# Altium footprint library FootPrintLib_8.PcbLib: 590 footprints (part 32 of 37)
Each footprint in its own frame and in the unit in brackets; x right, y up, seen from the top. Pads: shape width x height; smd on the part's side, far side on the other; paste and mask are expansions set on the pad; w line width, h text height; cw(c..) or ccw(c..) is an arc to the next point about the centre after c.
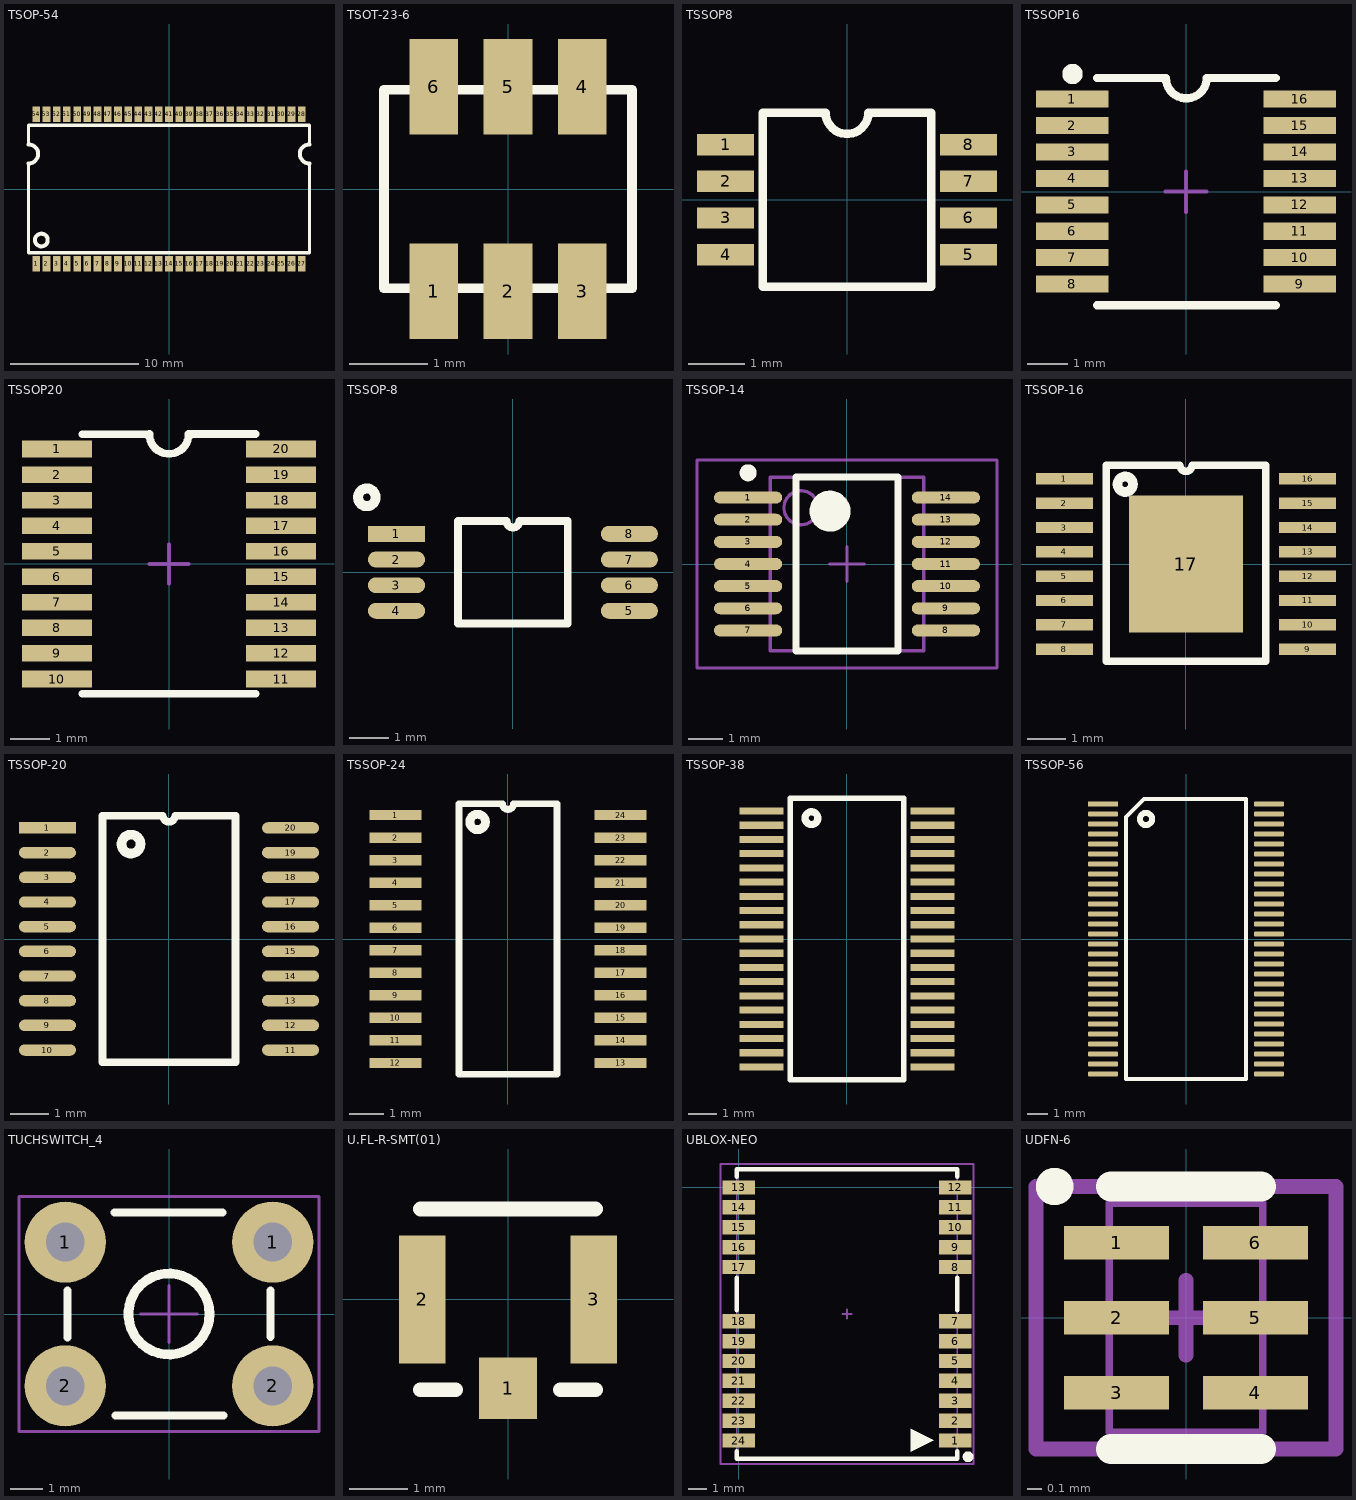
[diagram p31: the footprints below, top view; thin cyan lines are the x and y axes]

## TSOP-54 [mm] "SDRAM Memory IC"
height 2
pads (54):
  rect 0.6x1.2 smd: 1(-10.4,-5.85) 2(-9.6,-5.85) 3(-8.8,-5.85) 4(-8,-5.85) 5(-7.2,-5.85) 6(-6.4,-5.85) 7(-5.6,-5.85) 8(-4.8,-5.85) 9(-4,-5.85) 10(-3.2,-5.85) 11(-2.4,-5.85) 12(-1.6,-5.85) 13(-0.8,-5.85) 14(0,-5.85) 15(0.8,-5.85) 16(1.6,-5.85) 17(2.4,-5.85) 18(3.2,-5.85) 19(4,-5.85) 20(4.8,-5.85) 21(5.6,-5.85) 22(6.4,-5.85) 23(7.2,-5.85) 24(8,-5.85) 25(8.8,-5.85) 26(9.6,-5.85) 27(10.4,-5.85) 28(10.4,5.85) 29(9.6,5.85) 30(8.8,5.85) 31(8,5.85) 32(7.2,5.85) 33(6.4,5.85) 34(5.6,5.85) 35(4.8,5.85) 36(4,5.85) 37(3.2,5.85) 38(2.4,5.85) 39(1.6,5.85) 40(0.8,5.85) 41(0,5.85) 42(-0.8,5.85) 43(-1.6,5.85) 44(-2.4,5.85) 45(-3.2,5.85) 46(-4,5.85) 47(-4.8,5.85) 48(-5.6,5.85) 49(-6.4,5.85) 50(-7.2,5.85) 51(-8,5.85) 52(-8.8,5.85) 53(-9.6,5.85) 54(-10.4,5.85)
Top Overlay:
  circle w0.305: c-10,-4 r0.5
  lines w0.254: -11,2 -11,-5 11,-5 11,2 ; -11,3.5 -11,5 11,5 11,3.5
  lines w0.305: -11,2 ccw(c-11,2.75) -11,3.5 ; 11,2 cw(c11,2.75) 11,3.5

## TSOT-23-6 [mm]
height 0.7
pads (6):
  rect 0.622x1.22 smd: 1(-0.95,-1.31) 2(0,-1.31) 3(0.95,-1.31) 4(0.95,1.31) 5(0,1.31) 6(-0.95,1.31)
Top Overlay:
  lines w0.127: -1.587,-1.27 1.587,-1.27 1.587,1.27 -1.587,1.27 -1.587,-1.27

## TSSOP8 [mil]
height 47.24
pads (8):
  rect 40x15 smd: 1(-85,38.39) 2(-85,12.8) 3(-85,-12.79) 4(-85,-38.39) 5(85,-38.39) 6(85,-12.79) 7(85,12.79) 8(85,38.39)
Top Overlay:
  lines w5.98: -59.06,-61.02 -59.06,61.02 -15,61.02 ccw(c0,61.02) 15,61.02 59.06,61.02 59.06,-61.02 -59.06,-61.02
3D body "SW3dPS-TSSOP8-1.STEP": height 43.31, standoff 0, extent -80.7,-61.03 80.71,61.02

## TSSOP16 [mm] "16 Pin TSSOP JDEC MO-153 Variation AC"
height 1.2
pads (16):
  rect 1.78x0.42 smd: 1(-2.8,2.275) 2(-2.8,1.625) 3(-2.8,0.975) 4(-2.8,0.325) 5(-2.8,-0.325) 6(-2.8,-0.975) 7(-2.8,-1.625) 8(-2.8,-2.275) 9(2.8,-2.275) 10(2.8,-1.625) 11(2.8,-0.975) 12(2.8,-0.325) 13(2.8,0.325) 14(2.8,0.975) 15(2.8,1.625) 16(2.8,2.275)
Top Overlay:
  circle w0.25: c-2.794,2.894 r0.125
  lines w0.2: -2.192,-2.794 2.208,-2.794 ; -2.192,2.794 -0.492,2.794 ccw(c0.008,2.794) 0.508,2.794 2.208,2.794
Mechanical 15:
  lines w0.1: -0.5,0 0.5,0 ; 0,-0.5 0,0.5
3D body "User Library-TSSOP-16-1.STEP": height 1.1, standoff 0, extent -3.2,-2.5 3.2,2.5

## TSSOP20 [mm] "20 Pin TSSOP JDEC MO-153 Variation AC"
height 1.2
pads (20):
  rect 1.78x0.42 smd: 1(-2.85,2.925) 2(-2.85,2.275) 3(-2.85,1.625) 4(-2.85,0.975) 5(-2.85,0.325) 6(-2.85,-0.325) 7(-2.85,-0.975) 8(-2.85,-1.625) 9(-2.85,-2.275) 10(-2.85,-2.925) 11(2.85,-2.925) 12(2.85,-2.275) 13(2.85,-1.625) 14(2.85,-0.975) 15(2.85,-0.325) 16(2.85,0.325) 17(2.85,0.975) 18(2.85,1.625) 19(2.85,2.275) 20(2.85,2.925)
Top Overlay:
  lines w0.2: -2.2,-3.3 2.2,-3.3 ; -2.2,3.3 -0.5,3.3 ; -0.5,3.302 ccw(c0,3.302) 0.5,3.302 2.2,3.302
Mechanical 15:
  lines w0.1: -0.5,0 0.5,0 ; 0,-0.5 0,0.5
3D body "User Library-tssop-20-1.STEP": height 1.2, standoff 0, extent -3.3,-3.3 3.3,3.3

## TSSOP-8 [mm]
pads (8):
  rect 1.45x0.4 smd: 1(-2.95,0.975)
  oval 1.45x0.4 smd: 2(-2.95,0.325) 3(-2.95,-0.325) 4(-2.95,-0.975) 5(2.95,-0.975) 6(2.95,-0.325) 7(2.95,0.325) 8(2.95,0.975)
Top Overlay:
  circle w0.254: c-3.7,1.9 r0.224
  lines w0.2: -1.39,-1.3 1.39,-1.3 1.39,1.3 0.162,1.3 cw(c0,1.3) -0.162,1.3 -1.39,1.3 -1.39,-1.3
3D body "User Library-TSSOP-8.STEP": height 1.2, standoff 0, extent -3.2,-1.5 3.2,1.5

## TSSOP-14 [mm]
pads (14):
  oval 2x0.35 smd: 1(-2.9,1.95) 2(-2.9,1.3) 3(-2.9,0.65) 4(-2.9,0) 5(-2.9,-0.65) 6(-2.9,-1.3) 7(-2.9,-1.95) 8(2.9,-1.95) 9(2.9,-1.3) 10(2.9,-0.65) 11(2.9,0) 12(2.9,0.65) 13(2.9,1.3) 14(2.9,1.95)
Top Overlay:
  circle w0.6: c-0.5,1.55 r0.3
  circle w0.25: c-2.9,2.675 r0.125
  lines w0.2: -1.5,-2.55 1.5,-2.55 1.5,2.55 -1.5,2.55 -1.5,-2.55
Mechanical 13:
  circle w0.1: c-1.35,1.65 r0.5
  lines w0.1: -2.25,-2.55 2.25,-2.55 2.25,2.55 -2.25,2.55 -2.25,-2.55
Mechanical 15:
  lines w0.1: -0.5,0 0.5,0 ; 0,-0.5 0,0.5 ; -4.4,-3.05 4.4,-3.05 4.4,3.05 -4.4,3.05 -4.4,-3.05
3D body "User Library-TSSOP-14.STEP": height 1.2, standoff 0, extent -3.2,-2.5 3.2,2.5

## TSSOP-16 [mm]
pads (17):
  rect 1.5x0.3 smd: 1(-3.2,2.24) 2(-3.2,1.6) 3(-3.2,0.96) 4(-3.2,0.32) 5(-3.2,-0.32) 6(-3.2,-0.96) 7(-3.2,-1.6) 8(-3.2,-2.24) 9(3.2,-2.24) 10(3.2,-1.6) 11(3.2,-0.96) 12(3.2,-0.32) 13(3.2,0.32) 14(3.2,0.96) 15(3.2,1.6) 16(3.2,2.24)
  rect 3x3.6 smd: 17(0,0)
Top Overlay:
  circle w0.254: c-1.6,2.1 r0.204
  lines w0.2: -2.1,-2.56 2.1,-2.56 2.1,2.605 0.163,2.605 cw(c0,2.605) -0.162,2.605 -2.1,2.605 -2.1,-2.56
3D body "User Library-TSSOP-16-1.STEP": height 1.1, standoff 0, extent -3.2,-2.5 3.2,2.5

## TSSOP-20 [mm]
pads (20):
  rect 1.5x0.3 smd: 1(-3.2,2.925)
  oval 1.5x0.3 smd: 2(-3.2,2.275) 3(-3.2,1.625) 4(-3.2,0.975) 5(-3.2,0.325) 6(-3.2,-0.325) 7(-3.2,-0.975) 8(-3.2,-1.625) 9(-3.2,-2.275) 10(-3.2,-2.925) 11(3.2,-2.925) 12(3.2,-2.275) 13(3.2,-1.625) 14(3.2,-0.975) 15(3.2,-0.325) 16(3.2,0.325) 17(3.2,0.975) 18(3.2,1.625) 19(3.2,2.275) 20(3.2,2.925)
Top Overlay:
  circle w0.254: c-1,2.5 r0.25
  lines w0.2: -1.75,-3.25 1.75,-3.25 1.75,3.25 0.162,3.25 cw(c0,3.25) -0.162,3.25 -1.75,3.25 -1.75,-3.25
3D body "User Library-TSSOP-20-2.STEP": height 1.2, standoff 0, extent -3.2,-3.25 3.2,3.25

## TSSOP-24 [mm]
pads (24):
  rect 1.5x0.3 smd: 1(-3.25,3.575)
  rect 1.5x0.3 smd mask+0.05: 2(-3.25,2.925) 3(-3.25,2.275) 4(-3.25,1.625) 5(-3.25,0.975) 6(-3.25,0.325) 7(-3.25,-0.325) 8(-3.25,-0.975) 9(-3.25,-1.625) 10(-3.25,-2.275) 11(-3.25,-2.925) 12(-3.25,-3.575) 13(3.25,-3.575) 14(3.25,-2.925) 15(3.25,-2.275) 16(3.25,-1.625) 17(3.25,-0.975) 18(3.25,-0.325) 19(3.25,0.325) 20(3.25,0.975) 21(3.25,1.625) 22(3.25,2.275) 23(3.25,2.925) 24(3.25,3.575)
Top Overlay:
  circle w0.254: c-0.875,3.375 r0.224
  lines w0.2: -1.415,-3.9 1.415,-3.9 1.415,3.9 0.162,3.9 cw(c0,3.9) -0.162,3.9 -1.415,3.9 -1.415,-3.9
3D body "User Library-TSSOP-24.STEP": height 1.2, standoff 0, extent -3.1,-3.9 3.3,3.9

## TSSOP-38 [mm]
pads (38):
  rect 1.55x0.25 smd mask+0.05: 1(-3,4.5) 2(-3,4) 3(-3,3.5) 4(-3,3) 5(-3,2.5) 6(-3,2) 7(-3,1.5) 8(-3,1) 9(-3,0.5) 10(-3,0) 11(-3,-0.5) 12(-3,-1) 13(-3,-1.5) 14(-3,-2) 15(-3,-2.5) 16(-3,-3) 17(-3,-3.5) 18(-3,-4) 19(-3,-4.5) 20(3,-4.5) 21(3,-4) 22(3,-3.5) 23(3,-3) 24(3,-2.5) 25(3,-2) 26(3,-1.5) 27(3,-1) 28(3,-0.5) 29(3,0) 30(3,0.5) 31(3,1) 32(3,1.5) 33(3,2) 34(3,2.5) 35(3,3) 36(3,3.5) 37(3,4) 38(3,4.5)
Top Overlay:
  circle w0.254: c-1.25,4.25 r0.224
  lines w0.2: -2,-4.95 -2,4.95 2,4.95 2,-4.95 -2,-4.95
3D body "User Library-TSSOP-38-1.STEP": height 1.2, standoff 0, extent -3.2,-4.85 3.2,4.85

## TSSOP-56 [mm]
pads (56):
  rect 1.5x0.25 smd mask+0.05: 1(-4.15,6.75)
  rrect50% 1.5x0.25 smd mask+0.05: 2(-4.15,6.25) 3(-4.15,5.75) 4(-4.15,5.25) 5(-4.15,4.75) 6(-4.15,4.25) 7(-4.15,3.75) 8(-4.15,3.25) 9(-4.15,2.75) 10(-4.15,2.25) 11(-4.15,1.75) 12(-4.15,1.25) 13(-4.15,0.75) 14(-4.15,0.25) 15(-4.15,-0.25) 16(-4.15,-0.75) 17(-4.15,-1.25) 18(-4.15,-1.75) 19(-4.15,-2.25) 20(-4.15,-2.75) 21(-4.15,-3.25) 22(-4.15,-3.75) 23(-4.15,-4.25) 24(-4.15,-4.75) 25(-4.15,-5.25) 26(-4.15,-5.75) 27(-4.15,-6.25) 28(-4.15,-6.75) 29(4.15,-6.75) 30(4.15,-6.25) 31(4.15,-5.75) 32(4.15,-5.25) 33(4.15,-4.75) 34(4.15,-4.25) 35(4.15,-3.75) 36(4.15,-3.25) 37(4.15,-2.75) 38(4.15,-2.25) 39(4.15,-1.75) 40(4.15,-1.25) 41(4.15,-0.75) 42(4.15,-0.25) 43(4.15,0.25) 44(4.15,0.75) 45(4.15,1.25) 46(4.15,1.75) 47(4.15,2.25) 48(4.15,2.75) 49(4.15,3.25) 50(4.15,3.75) 51(4.15,4.25) 52(4.15,4.75) 53(4.15,5.25) 54(4.15,5.75) 55(4.15,6.25) 56(4.15,6.75)
Top Overlay:
  circle w0.3: c-2,6 r0.305
  lines w0.2: -3,-7 3,-7 3,7 -2.1,7 -3,6.1 -3,-7
3D body "SW3dPS-TSSOP-56.STEP": height 1.14, standoff -0.4, extent -4.075,-7.04 4.07,7.04

## TUCHSWITCH_4 [mm] "Miniature Push Button Switch,B3F Series;body 6 x 6mm, 4-Leads"
height 5.4
pads (4):
  round 2.54 hole 1.219: 1(-3.25,2.25) 1(3.25,2.25) 2(-3.25,-2.25) 2(3.25,-2.25)
Top Overlay:
  circle w0.305: c0,0 r1.27
  lines w0.254: -3.175,-0.737 -3.175,0.737 ; -1.702,3.175 1.676,3.175 ; -1.676,-3.175 1.702,-3.175 ; 3.175,-0.711 3.175,0.737
Mechanical 15:
  lines w0.1: -0.889,0 0,0 ; 0,-0.889 0,0 ; 0,0.889 0,0 ; 0.889,0 0,0 ; -4.699,-3.683 -4.699,3.683 4.699,3.683 4.699,-3.683 -4.699,-3.683
3D body "User Library-Tactile switch 6x6x5mm.STEP": height 5.01, standoff -3.51, extent -3.821,-3.015 3.921,3.015

## U.FL-R-SMT(01) [mm]
height 3.1
pads (3):
  rect 1x1.05 smd: 1(0,-1.525)
  rect 0.8x2.2 smd: 2(-1.475,0) 3(1.475,0)
Top Overlay:
  lines w0.254: -1.5,-1.55 -0.9,-1.55 ; -1.5,1.55 1.5,1.55 ; 0.9,-1.55 1.5,-1.55
3D body "UFL-R-SMD.STEP": height 1.25, standoff 0, extent -1.7,-1.554 1.7,1.546

## UBLOX-NEO [mm] "UBLOX GPS Module NEO 5,6,7,M8"
pads (24):
  rect 1.8x0.8 smd: 1(12,-14) 2(12,-12.9) 3(12,-11.8) 4(12,-10.7) 5(12,-9.6) 6(12,-8.5) 7(12,-7.4) 8(12,-4.4) 9(12,-3.3) 10(12,-2.2) 11(12,-1.1) 12(12,0) 13(0,0) 14(0,-1.1) 15(0,-2.2) 16(0,-3.3) 17(0,-4.4) 18(0,-7.4) 19(0,-8.5) 20(0,-9.6) 21(0,-10.7) 22(0,-11.8) 23(0,-12.9) 24(0,-14)
Top Overlay:
  circle w0.3: c12.7,-14.9 r0.15
  region: 10.792,-13.977 9.522,-13.342 9.522,-14.612
  lines w0.254: -0.1,-14.6 -0.1,-15 12.1,-15 12.1,-14.6 ; -0.1,-6.8 -0.1,-5 ; -0.1,0.6 -0.1,1 12.1,1 12.1,0.6 ; 12.1,-6.8 12.1,-5
Mechanical 13:
  lines w0.1: -0.1,-15 -0.1,1 12.1,1 12.1,-15 -0.1,-15
Mechanical 15:
  lines w0.1: 5.746,-7 6.254,-7 ; 6,-7.254 6,-6.746 ; -1,-15.3 13,-15.3 13,1.3 -1,1.3 -1,-15.3
3D body "User Library-UBLOX_GPS_NEO-6M.STEP": height 2.64, standoff 0, extent -0.18,-15.3 12.18,1.3

## UDFN-6 [mil] "1.5mm x 1.0mm x 0.75mm,  6-pin ¦ÌDFN package."
height 29.53
pads (6):
  rect 28x9 smd mask+4: 1(-18.5,20) 2(-18.5,0) 3(-18.5,-20) 4(18.5,-20) 5(18.5,0) 6(18.5,20)
Top Overlay:
  circle w6: c-35,35 r2
  lines w7.87: -20,-35 20,-35 ; -20,35 20,35
Mechanical 13:
  lines w2: -20.5,-30.5 -20.5,30.5 20.5,30.5 20.5,-30.5 -20.5,-30.5
Mechanical 15:
  lines w3.94: -10,0 10,0 ; 0,-10 0,10 ; -40,-35 40,-35 40,35 -40,35 -40,-35
3D body: height 29.53, standoff 0, extent -20,-30 20,30
3D body: height 29.57, standoff 0, extent -13.9,16.07 -6.06,23.93